# Altium footprint library Footprint-Lib-PhilsLab.PcbLib: 544 footprints (part 17 of 34)
Each footprint in its own frame and in the unit in brackets; x right, y up, seen from the top. Pads: shape width x height; smd on the part's side, far side on the other; paste and mask are expansions set on the pad; w line width, h text height; cw(c..) or ccw(c..) is an arc to the next point about the centre after c.
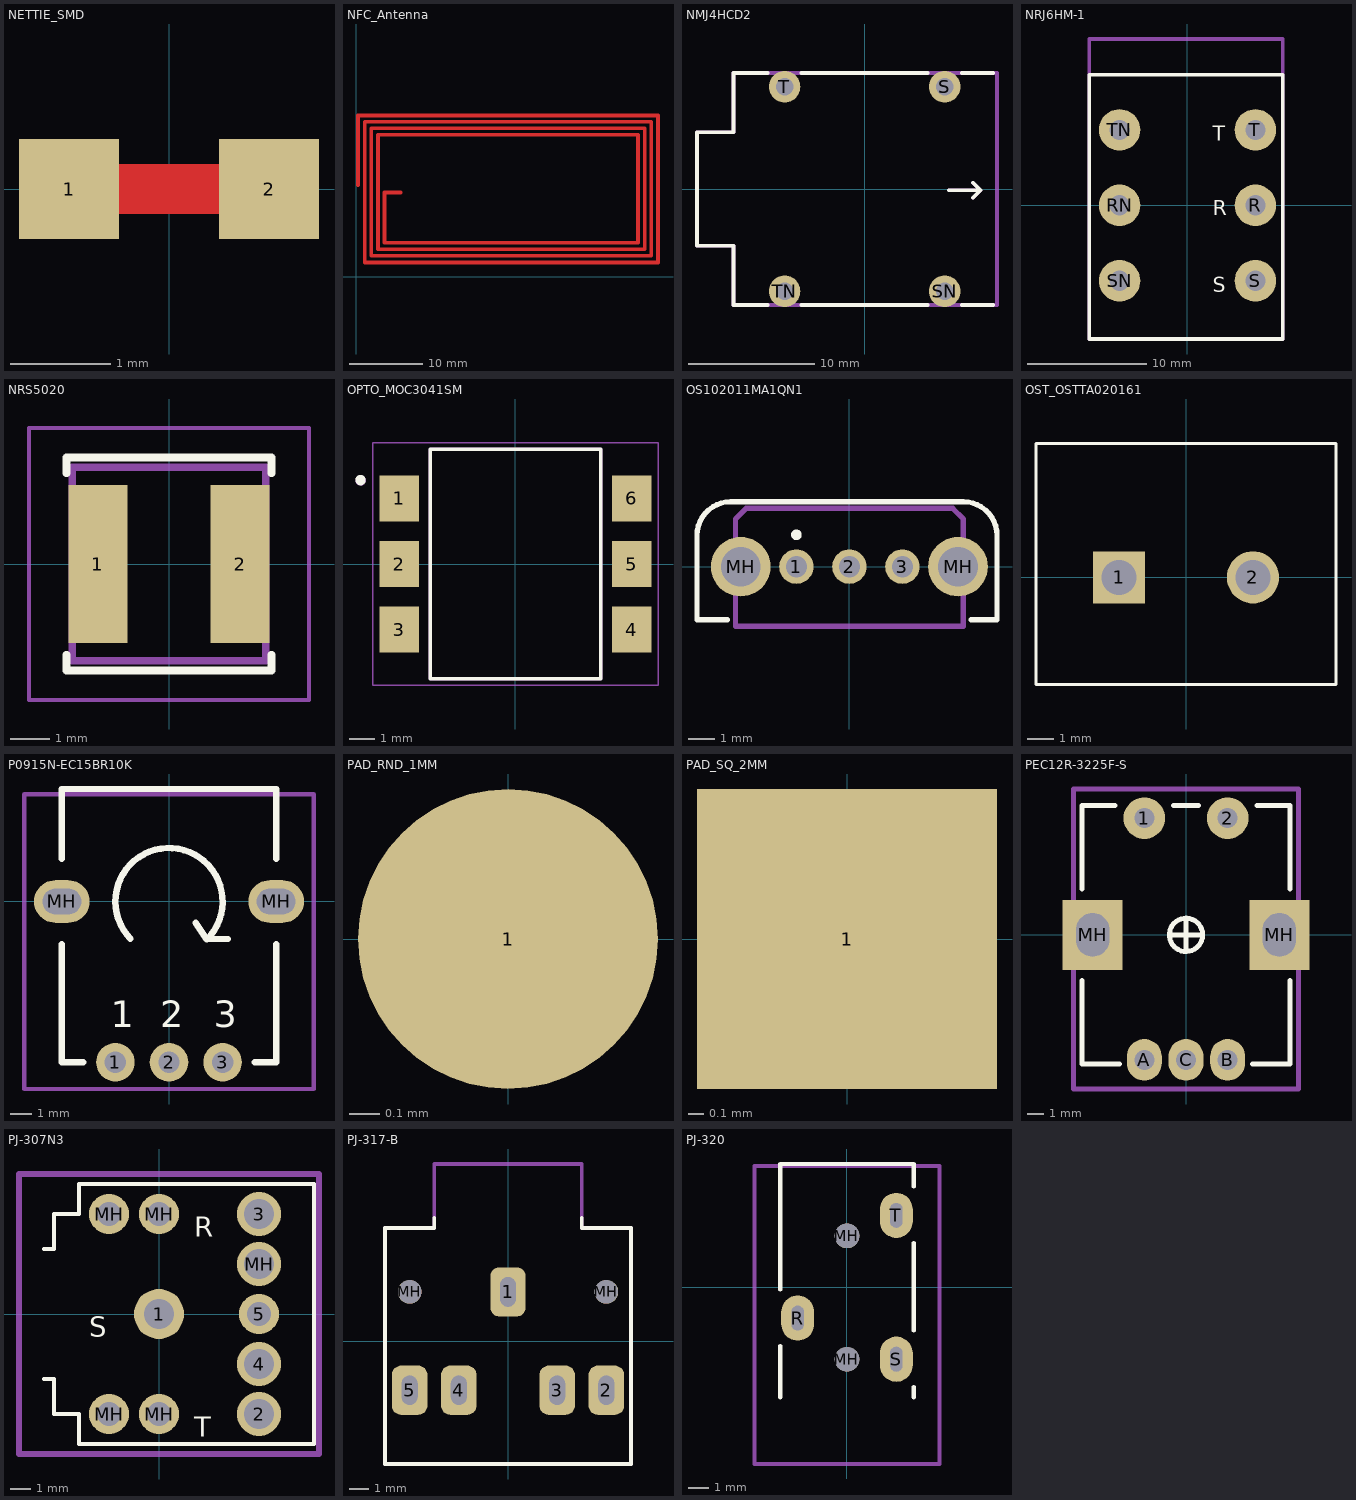
[diagram p16: the footprints below, top view; thin cyan lines are the x and y axes]

## NETTIE_SMD [mm]
pads (2):
  rect 1x1 smd mask-10: 1(-1,0) 2(1,0)
Top Layer:
  rectangle: -0.75,-0.25 0.75,0.25

## NFC_Antenna [mm]
Top Layer:
  lines w0.4: 0.7,22.025 0.77,22.025
  lines w0.5: 0.23,12.51 0.23,22.025 0.29,22.025 1.25,22.025 41.225,22.025 41.225,1.95 1.15,1.95 1.15,21.175 40.3,21.175 40.3,2.86 2.05,2.86 2.05,20.3 39.425,20.3 39.425,3.74 2.97,3.74 2.97,19.4 38.5,19.4 38.5,4.63 3.86,4.63 3.86,11.52 6.05,11.52

## NMJ4HCD2 [mm]
pads (4):
  round 2.5 hole 1.4: S(6.35,8.115) SN(6.35,-8.115) T(-6.35,8.115) TN(-6.35,-8.115)
Top Overlay:
  lines w0.2: 9.2,-0.1 9.2,-0.1 ; 9.2,-0.1 9.2,-0.1
  lines w0.3: -7.7,-9.2 -10.4,-9.2 -10.4,-4.5 -13.3,-4.5 -13.3,4.5 -10.5,4.5 -10.4,4.5 -10.4,9.2 -7.7,9.2 ; -5,-9.2 5,-9.2 ; -5,9.2 5,9.2 ; 6.7,-0.1 9.2,-0.1 ; 7.7,-9.2 10.2,-9.2 ; 7.7,9.2 10.2,9.2 ; 8.6,-0.7 9.2,-0.1 ; 8.6,0.5 9.2,-0.1
Mechanical 13:
  lines w0.2: 9.2,-0.1 9.2,-0.1 ; 9.2,-0.1 9.2,-0.1
  lines w0.3: 6.7,-0.1 9.2,-0.1 ; 8.6,-0.7 9.2,-0.1 ; 8.6,0.5 9.2,-0.1 ; -13.3,-4.5 -13.3,4.5 -10.5,4.5 -10.4,4.5 -10.4,9.2 10.5,9.2 10.5,-9.2 -10.4,-9.2 -10.4,-4.5 -13.3,-4.5
  text "'.Designator'" at -5.665,-0.417 h1
3D body "NMJ4HCD20.stp": height 15.68, standoff -3.99, extent -13.18,-9.1 13.35,9.1

## NRJ6HM-1 [mm]
pads (6):
  round 3.5 hole 1.7: R(5.715,0) RN(-5.715,0) S(5.715,-6.35) SN(-5.715,-6.35) T(5.715,6.35) TN(-5.715,6.35)
Top Overlay:
  lines w0.3: -8.25,-11.25 -8.25,11 8,11 8,-11.25 -8.25,-11.25
  text "T" at 2.133,5.425 h1.25
  text "R" at 2.133,-0.825 h1.25
  text "S" at 2.133,-7.325 h1.25
Mechanical 13:
  lines w0.3: -8.25,-11.25 -8.25,14 8,14 8,-11.25 -8.25,-11.25
  text "'.Designator'" at -5.815,-0.9 h1
3D body "NRJ6HM-1.stp": height 12.71, standoff -3.99, extent -7.945,-19.3 7.805,13.7

## NRS5020 [mm]
pads (2):
  rect 1.5x4 smd: 1(-1.8,0) 2(1.8,0)
Top Overlay:
  lines w0.2: -2.6,-2.3 -2.6,-2.7 2.6,-2.7 2.6,-2.3 ; -2.6,2.3 -2.6,2.7 2.6,2.7 2.6,2.3
Mechanical 13:
  lines w0.2: -2.45,-2.45 2.45,-2.45 2.45,2.45 -2.45,2.45 -2.45,-2.45
  text "'.Designator'" at -5.815,-0.9 h1
Mechanical 15:
  lines w0.1: -3.55,-3.45 3.55,-3.45 3.55,3.45 -3.55,3.45 -3.55,-3.45
3D body "NRS5020T4R7MMGJ.stp": height 2.1, standoff 0, extent -2.45,-2.45 2.45,2.45

## OPTO_MOC3041SM [mm]
pads (6):
  rect 1.52x1.78 smd: 1(-4.505,2.54) 2(-4.505,0) 3(-4.505,-2.54) 4(4.505,-2.54) 5(4.505,0) 6(4.505,2.54)
Top Overlay:
  circle w0.2: c-6,3.25 r0.1
  lines w0.127: -3.3,-4.445 3.3,-4.445 3.3,3.65 3.3,4.445 -3.3,4.445 -3.3,3.65 -3.3,-4.445
Mechanical 13:
  circle w0.2: c-5.998,3.235 r0.1
  lines w0.127: -3.3,-4.445 -3.3,4.445 3.3,4.445 3.3,-4.445 -3.3,-4.445
Mechanical 15:
  lines w0.05: -5.52,-4.695 -5.52,4.695 5.52,4.695 5.52,-4.695 -5.52,-4.695
3D body "MOC3041SM.STEP": height 4.8, standoff 0, extent -5.165,-4.255 4,4.255

## OS102011MA1QN1 [mm]
pads (5):
  round 1.3 hole 0.8: 1(-2,0) 2(0,0) 3(2,0)
  round 2.25 hole 1.5: MH(-4.1,0) MH(4.1,0)
Top Overlay:
  circle w0.2: c-2,1.2 r0.099
  lines w0.2: -4.6,-2 -5.75,-2 -5.75,0 -5.75,1.18 cw(c-4.48,1.18) -4.48,2.45 -4.3,2.45 4.3,2.45 cw(c4.3,1.18) 5.57,1.18 5.57,0 5.57,-2 4.6,-2
Mechanical 13:
  lines w0.2: -4.3,-2.25 -4.3,1.8 -3.9,2.2 3.9,2.2 4.3,1.8 4.3,-2.25 -4.3,-2.25
  text "'.Designator'" at -6.315,-1.4 h1
3D body "OS102011MA1QN1.stp": height 4.59, standoff -3.01, extent -4.301,-6.215 4.299,2.185

## OST_OSTTA020161 [mm]
pads (2):
  rect 1.95x1.95 / inner round 1.95 / far side rect 1.95x1.95 hole 1.3: 1(-2.5,0)
  round 1.95 hole 1.3: 2(2.5,0)
Top Overlay:
  lines w0.127: -5.6,-4 5.6,-4 5.6,5 -5.6,5 -5.6,-4
3D body "step_temp.STEP": height 12.6, standoff -3.8, extent -5.6,-4.5 5,4.5

## P0915N-EC15BR10K [mm]
pads (5):
  round 1.8 hole 1: 1(-2.5,-7.5) 2(0,-7.5) 3(2.5,-7.5)
  oval 2.6x2 hole 1.2 slot 1.8 at 0 deg: MH(-5,0) MH(5,0)
Top Overlay:
  lines w0.3: -5,-2 -5,-7.5 -4,-7.5 ; -5,2 -5,5.25 5,5.25 5,2 ; -1.798,-1.737 cw(c0,0) 1.768,-1.768 ; 1.25,-1 1.768,-1.768 ; 2.75,-1.75 1.768,-1.768 ; 4,-7.5 5,-7.5 5,-2
  text "3" at 2.083,-5.875 h1.25
  text "2" at -0.417,-5.875 h1.25
  text "1" at -2.708,-5.875 h1.25
Mechanical 13:
  lines w0.2: -6.75,-8.75 6.75,-8.75 6.75,5 -6.75,5 -6.75,-8.75
  text "'.Designator'" at -5.815,-0.9 h1
  text "3" at 2.083,-5.875 h1.25
  text "2" at -0.417,-5.875 h1.25
  text "1" at -2.708,-5.875 h1.25
3D body "P0915N-EC15BR10K.stp": height 25.01, standoff -3.29, extent -6.049,-7.65 6.049,4.85

## PAD_RND_1MM [mm]
pads (1):
  round 1 smd paste-0.5 mask+0: 1(0,0)

## PAD_SQ_2MM [mm]
pads (1):
  rect 2x2 smd paste-1: 1(0,0)

## PCBComponent_1 [mm]

## PEC12R-3225F-S [mm]
pads (7):
  round 2.5 hole 1.2: 1(-2.5,7) 2(2.5,7)
  oval 2.1x2.5 hole 1.2: A(-2.5,-7.5) B(2.5,-7.5) C(0,-7.5)
  rect 3.6x4.2 hole 2 slot 2.6 at 90 deg: MH(-5.6,0) MH(5.6,0)
Top Overlay:
  circle w0.3: c0,0 r1
  lines w0.3: -6.25,-2.75 -6.25,-7.75 -4,-7.75 ; -6.25,2.75 -6.25,7.75 -4.25,7.75 ; -1,0 1,0 ; -0.75,7.75 0.75,7.75 ; 0,-1 0,1 ; 4,-7.75 6.25,-7.75 6.25,-2.75 ; 4.25,7.75 6.25,7.75 6.25,2.75
Mechanical 13:
  lines w0.3: -6.75,-9.25 -6.75,8.75 6.75,8.75 6.75,-9.25 -6.75,-9.25
  text "'.Designator'" at -5.665,-0.417 h1
3D body "PEC12R-3225F-S.step": height 25.01, standoff -3.49, extent -5.75,-7.25 5.75,7.25

## PJ-307N3 [mm]
pads (10):
  round 2.5 hole 1.5: 1(0,0)
  round 2.2 hole 1.5: 2(5,-5) 3(5,5) 4(5,-2.5) MH(5,2.5)
  round 2 hole 1.2: 5(5,0) MH(-2.5,-5) MH(-2.5,5) MH(0,-5) MH(0,5)
Top Overlay:
  lines w0.2: -5.75,-3.25 -5.25,-3.25 -5.25,-5 -4,-5 -4,-6.5 7.75,-6.5 7.75,-5.75 7.75,6.5 -4,6.5 -4,5 -5.25,5 -5.25,3.25 -5.75,3.25
  text "S" at -3.483,-1.15 h1
  text "T" at 1.767,-6.15 h1
  text "R" at 1.767,3.85 h1
Mechanical 13:
  lines w0.3: -7,-7 8,-7 8,7 -7,7 -7,-7
  text "'.Designator'" at -6.315,-1.4 h1
3D body "pj-307n3.stp": height 5.51, standoff -3.49, extent -6.6,-6 7.4,6

## PJ-317-B [mm]
pads (7):
  rrect50% 1.8x2.5 hole 0.8 slot 1.5 at 90 deg mask+0.07: 1(0,2.5) 2(5,-2.5) 3(2.5,-2.5) 4(-2.5,-2.5) 5(-5,-2.5)
  round 1.2 hole 1.2 unplated mask+0.07: MH(-5,2.5) MH(5,2.5)
Top Overlay:
  lines w0.2: -3.75,6.25 -3.75,5.75 -6.25,5.75 -6.25,-6.25 6.25,-6.25 6.25,5.75 3.75,5.75 3.75,6.25
Mechanical 13:
  lines w0.2: -6.25,-6.25 6.25,-6.25 6.25,5.75 3.75,5.75 3.75,9 -3.75,9 -3.75,5.75 -6.25,5.75 -6.25,-6.25
  text "'.Designator'" at -7.231,-1.087 h1.25
3D body "pj-317-b.stp": height 10.01, standoff -3.99, extent -6,-6.1 6,9

## PJ-320 [mm]
pads (5):
  round 1.2 hole 1.2 unplated: MH(0,-3.5) MH(0,2.5)
  oval 1.6x2.2 hole 0.6 slot 1.2 at 90 deg: R(-2.4,-1.5) S(2.4,-3.5) T(2.4,3.5)
Top Overlay:
  lines w0.2: -3.25,-5.35 -3.25,-2.85 ; -3.25,-0.1 -3.25,6 3.25,6 3.25,4.9 ; 3.25,-5.35 3.25,-4.85 ; 3.25,-2.1 3.25,2.15
Mechanical 13:
  lines w0.2: -4.5,-8.6 4.5,-8.6 4.5,5.9 -4.5,5.9 -4.5,-8.6
  text ".Designator" at -4.998,-0.333 h1
3D body "pj-320b.stp": height 5.01, standoff -0.49, extent -4.25,-8.3 4.25,5.7